# Altium schematic symbol library Lab4_Altium_Files.SCHLIB: 90 symbols (part 1 of 2)
Pins are listed as number, name and electrical type; pins without a type are passive.

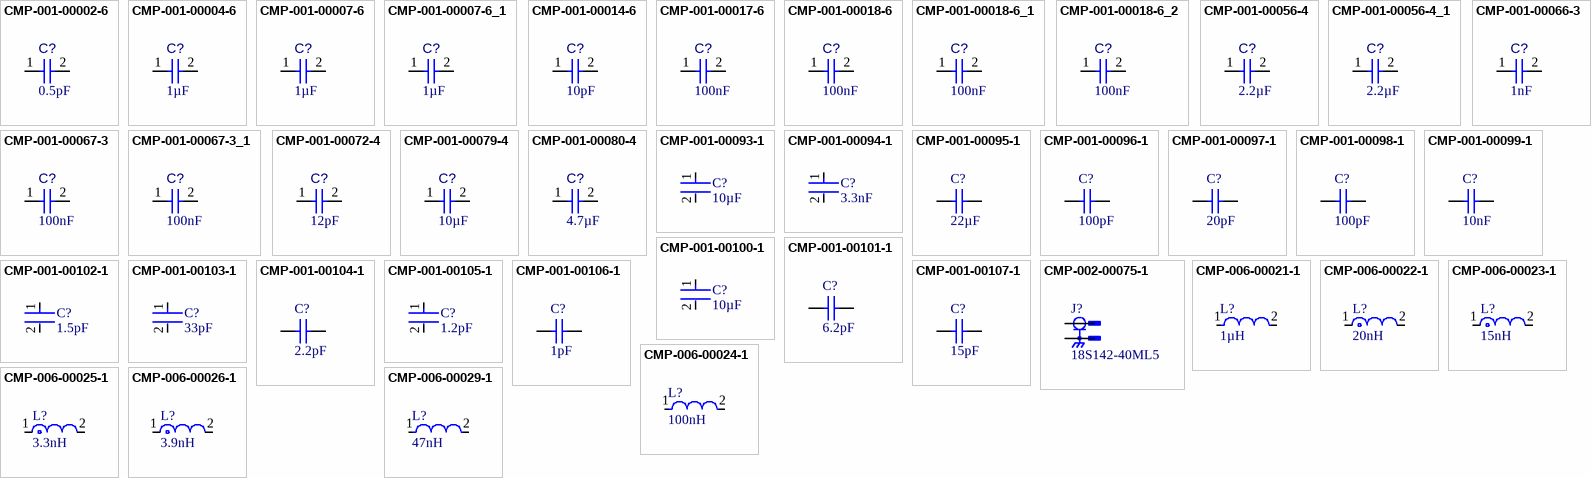
[diagram p0: symbols CMP-001-00002-6 to CMP-006-00029-1]

## CMP-001-00002-6
designator C?, comment value 0.5pF  (hidden comment: Capacitor 0.5 pF +/- 0.1pF 25 V 0402)
Chip Capacitor, 0.5 pF, +/- 0.1pF, 25 V, 0402 (1005 Metric); Voltage Rating: 25V; Tolerance: 20%; Capacitor Type: Ceramic; Max Operating Temperature: 125°C; Case/Package: 0402; Pins: 2; RoHS Compliant: True; Min Operating Temperature: -55°C; Mounting Technology: SM
footprint CAPC1005X56X25ML10T15 (Chip Capacitor, 2-Leads, Body 1.10x0.60mm, IPC Low Density)
footprint CAPC1005X56X25NL10T15 (Chip Capacitor, 2-Leads, Body 1.10x0.60mm, IPC Medium Density)
footprint CAPC1005X56X25LL10T15 (Chip Capacitor, 2-Leads, Body 1.10x0.60mm, IPC High Density)
pins: 1, 2

## CMP-001-00004-6
designator C?, comment value 1µF  (hidden comment: Capacitor 1uF +/- 10% 16V 0603)
Chip Capacitor, 1 uF, +/- 10%, 16 V, 0603 (1608 Metric); Capacitor Type: Ceramic; Mounting Technology: SM; RoHS Compliant: True; Min Operating Temperature: -55°C; Case/Package: 0603; Pins: 2; Voltage Rating: 16V; Max Operating Temperature: 125°C; Tolerance: 10%
footprint CAPC1608X90X35ML15T15 (Chip Capacitor, 2-Leads, Body 1.75x0.95mm, IPC Low Density)
footprint CAPC1608X90X35NL15T15 (Chip Capacitor, 2-Leads, Body 1.75x0.95mm, IPC Medium Density)
footprint CAPC1608X90X35LL15T15 (Chip Capacitor, 2-Leads, Body 1.75x0.95mm, IPC High Density)
pins: 1, 2

## CMP-001-00007-6
designator C?, comment value 1µF  (hidden comment: Capacitor 1 uF +/- 10% 50 V 0805)
Chip Capacitor, 1 uF, +/- 10%, 50 V, 0805 (2012 Metric); Capacitor Type: Ceramic; Voltage Rating: 50V; Min Operating Temperature: -55°C; RoHS Compliant: True; Mounting Technology: SM; Case/Package: 0805; Max Operating Temperature: 125°C; Tolerance: 10%; Pins: 2
footprint CAPC2013X135X45NL10T25 (Chip Capacitor, 2-Leads, Body 2.10x1.35mm, IPC Medium Density)
footprint CAPC2013X135X45LL10T25 (Chip Capacitor, 2-Leads, Body 2.10x1.35mm, IPC High Density)
footprint CAPC2013X135X45ML10T25 (Chip Capacitor, 2-Leads, Body 2.10x1.35mm, IPC Low Density)
pins: 1, 2

## CMP-001-00007-6_1
designator C?, comment value 1µF  (hidden comment: Capacitor 1 uF +/- 10% 50 V 0805)
Chip Capacitor, 1 uF, +/- 10%, 50 V, 0805 (2012 Metric); Manufacturer: TDK; Manufacturer Part Number: C2012X7R1H105K125AB; Manufacturer: Murata; Manufacturer Part Number: GRM21BR71H105KA12L; Manufacturer: Kyocera / AVX; Manufacturer Part Number: 08055C105KAT2A; Capacitor Type: Ceramic; Voltage Rating: 50V; Min Operating Temperature: -55°C; RoHS Compliant: True; Mounting Technology: SM; Case/Package: 0805; Max Operating Temperature: 125°C; Tolerance: 10%; Pins: 2; Component Type: Capacitors
footprint CAPC2013X135X45NL10T25 (Chip Capacitor, 2-Leads, Body 2.10x1.35mm, IPC Medium Density)
footprint CAPC2013X135X45LL10T25 (Chip Capacitor, 2-Leads, Body 2.10x1.35mm, IPC High Density)
footprint CAPC2013X135X45ML10T25 (Chip Capacitor, 2-Leads, Body 2.10x1.35mm, IPC Low Density)
pins: 1, 2

## CMP-001-00014-6
designator C?, comment value 10pF  (hidden comment: Capacitor 10 pF +/- 5% 50 V 0603)
Chip Capacitor, 10 pF, +/- 5%, 50 V, 0603 (1608 Metric); Capacitor Type: Ceramic; Voltage Rating: 50V; RoHS Compliant: True; Case/Package: 0603; Max Operating Temperature: 125°C; Pins: 2; Tolerance: 5%; Mounting Technology: SM; Min Operating Temperature: -55°C
footprint CAPC1608X90X40ML10T20 (Chip Capacitor, 2-Leads, Body 1.70x0.90mm, IPC Low Density)
footprint CAPC1608X90X40LL10T20 (Chip Capacitor, 2-Leads, Body 1.70x0.90mm, IPC High Density)
footprint CAPC1608X90X40NL10T20 (Chip Capacitor, 2-Leads, Body 1.70x0.90mm, IPC Medium Density)
pins: 1, 2

## CMP-001-00017-6
designator C?, comment value 100nF  (hidden comment: Capacitor 100 nF +/-10% 50 V 0603)
Chip Capacitor, 100 nF, +/- 10%, 50 V, 0603 (1608 Metric); Voltage Rating: 50V; Capacitor Type: Ceramic; Tolerance: 10%; Mounting Technology: SM; Max Operating Temperature: 125°C; RoHS Compliant: True; Pins: 2; Case/Package: 0603; Min Operating Temperature: -55°C
footprint CAPC1608X90X40NL10T20 (Chip Capacitor, 2-Leads, Body 1.70x0.90mm, IPC Medium Density)
footprint CAPC1608X90X40LL10T20 (Chip Capacitor, 2-Leads, Body 1.70x0.90mm, IPC High Density)
footprint CAPC1608X90X40ML10T20 (Chip Capacitor, 2-Leads, Body 1.70x0.90mm, IPC Low Density)
pins: 1, 2

## CMP-001-00018-6
designator C?, comment value 100nF  (hidden comment: Capacitor 100 nF +/-10% 50 V 0805)
Chip Capacitor, 100 nF, +/- 10%, 50 V, 0805 (2012 Metric); Capacitor Type: Ceramic; Voltage Rating: 50V; Pins: 2; Max Operating Temperature: 125°C; Min Operating Temperature: -55°C; Mounting Technology: SM; Case/Package: 0805; RoHS Compliant: True; Tolerance: 10%
footprint CAPC2013X95X50LL10T25 (Chip Capacitor, 2-Leads, Body 2.10x1.35mm, IPC High Density)
footprint CAPC2013X95X50NL10T25 (Chip Capacitor, 2-Leads, Body 2.10x1.35mm, IPC Medium Density)
footprint CAPC2013X95X50ML10T25 (Chip Capacitor, 2-Leads, Body 2.10x1.35mm, IPC Low Density)
pins: 1, 2

## CMP-001-00018-6_1
designator C?, comment value 100nF  (hidden comment: Capacitor 100 nF +/-10% 50 V 0805)
Chip Capacitor, 100 nF, +/- 10%, 50 V, 0805 (2012 Metric); Manufacturer: Yageo Group; Manufacturer Part Number: CC0805KRX7R9BB104; Manufacturer: Murata; Manufacturer Part Number: GRM21BR71H104KA01L; Capacitor Type: Ceramic; Voltage Rating: 50V; Pins: 2; Max Operating Temperature: 125°C; Min Operating Temperature: -55°C; Mounting Technology: SM; Case/Package: 0805; RoHS Compliant: True; Tolerance: 10%; Component Type: Capacitors
footprint CAPC2013X95X50LL10T25 (Chip Capacitor, 2-Leads, Body 2.10x1.35mm, IPC High Density)
footprint CAPC2013X95X50NL10T25 (Chip Capacitor, 2-Leads, Body 2.10x1.35mm, IPC Medium Density)
footprint CAPC2013X95X50ML10T25 (Chip Capacitor, 2-Leads, Body 2.10x1.35mm, IPC Low Density)
pins: 1, 2

## CMP-001-00018-6_2
designator C?, comment value 100nF  (hidden comment: Capacitor 100 nF +/-10% 50 V 0805)
Chip Capacitor, 100 nF, +/- 10%, 50 V, 0805 (2012 Metric); Capacitor Type: Ceramic; Voltage Rating: 50V; Pins: 2; Max Operating Temperature: 125°C; Min Operating Temperature: -55°C; Mounting Technology: SM; Case/Package: 0805; RoHS Compliant: True; Tolerance: 10%
footprint CAPC2013X95X50LL10T25 (Chip Capacitor, 2-Leads, Body 2.10x1.35mm, IPC High Density)
footprint CAPC2013X95X50NL10T25 (Chip Capacitor, 2-Leads, Body 2.10x1.35mm, IPC Medium Density)
footprint CAPC2013X95X50ML10T25 (Chip Capacitor, 2-Leads, Body 2.10x1.35mm, IPC Low Density)
pins: 1, 2

## CMP-001-00056-4
designator C?, comment value 2.2µF  (hidden comment: Capacitor 2,2µF +/-20% 10V 0402)
Chip Capacitor, 2,2µF +/-20%, 10V, 0402, Thickness 0.6 mm; Tolerance: 10%; Mounting Technology: SMT; Max Operating Temperature: 85°C; Case/Package: 0402; Pins: 2; Min Operating Temperature: -55°C; Voltage Rating: 10V
footprint CAPC0402(1005)60_L (Chip Capacitor, Body 1.0x0.5mm, Height 0.6mm, IPC High Density)
pins: 1, 2

## CMP-001-00056-4_1
designator C?, comment value 2.2µF  (hidden comment: Capacitor 2,2µF +/-20% 10V 0402)
Chip Capacitor, 2,2µF +/-20%, 10V, 0402, Thickness 0.6 mm; Manufacturer: Samsung Electro-Mechanics; Manufacturer Part Number: CL05A225KP7NSB8; Manufacturer: Murata; Manufacturer Part Number: GRM155R61C225KE11D; Manufacturer: TDK; Manufacturer Part Number: C1005X5R1A225K; Manufacturer Part Number: GRM155R61A225KE95D; Manufacturer Part Number: GRM155R61C225KE44D; Manufacturer Part Number: GRT155R61E225KE13D; Tolerance: 10%; Mounting Technology: SMT; Max Operating Temperature: 85°C; Case/Package: 0402; Pins: 2; Min Operating Temperature: -55°C; Voltage Rating: 10V; Component Type: Capacitors
footprint CAPC0402(1005)60_L (Chip Capacitor, Body 1.0x0.5mm, Height 0.6mm, IPC High Density)
pins: 1, 2

## CMP-001-00066-3
designator C?, comment value 1nF  (hidden comment: Capacitor 1nF +/-20% 50V 0402)
Chip Capacitor, 1nF +/-20%, 50V, 0402, Thickness 0.33 mm; Tolerance: 10%; Case/Package: 0402; Pins: 2; Min Operating Temperature: -55°C; Max Operating Temperature: 85°C; Voltage Rating: 50V; Mounting Technology: SMT
footprint CAPC0402(1005)33_L (Chip Capacitor, Body 1.0x0.5mm, Height 0.33mm, IPC High Density)
pins: 1, 2

## CMP-001-00067-3
designator C?, comment value 100nF  (hidden comment: Capacitor 100nF +/-20% 50V 0402)
Chip Capacitor, 100nF +/-20%, 50V, 0402, Thickness 0.6 mm; Tolerance: 10%; Min Operating Temperature: -55°C; Pins: 2; Case/Package: 0402; Max Operating Temperature: 85°C; Voltage Rating: 50V; Mounting Technology: SMT
footprint CAPC0402(1005)60_L (Chip Capacitor, Body 1.0x0.5mm, Height 0.6mm, IPC High Density)
pins: 1, 2

## CMP-001-00067-3_1
designator C?, comment value 100nF  (hidden comment: Capacitor 100nF +/-20% 50V 0402)
Chip Capacitor, 100nF +/-20%, 50V, 0402, Thickness 0.6 mm; Manufacturer: Murata; Manufacturer Part Number: GRM155R61H104JE14D; Manufacturer: TAIYO YUDEN; Manufacturer Part Number: UMK105B7104KV-FR; Manufacturer: TDK; Manufacturer Part Number: C1005X7R1H104K; Manufacturer: Yageo Group; Manufacturer Part Number: CC0402KRX7R9BB104; Manufacturer Part Number: C1005X6S1H104K050BB; Manufacturer Part Number: CC0402KRX5R9BB104; Manufacturer Part Number: C1005X7R1H104K050BB; Manufacturer Part Number: GRM155R71H104KE14D; Manufacturer: KYOCERA AVX; Manufacturer Part Number: 04025D104KAT2A; Manufacturer Part Number: GCM155L81E104KE02D; Manufacturer Part Number: C1005X5R1H104K; Tolerance: 10%; Min Operating Temperature: -55°C; Pins: 2; Case/Package: 0402; Max Operating Temperature: 85°C; Voltage Rating: 50V; Mounting Technology: SMT; Component Type: Capacitors
footprint CAPC0402(1005)60_L (Chip Capacitor, Body 1.0x0.5mm, Height 0.6mm, IPC High Density)
pins: 1, 2

## CMP-001-00072-4
designator C?, comment value 12pF  (hidden comment: Capacitor 12pF +/-10% 50V 0402)
Chip Capacitor, 12pF +/-10%, 50V, 0402, Thickness 0.33 mm; Tolerance: 20%; Pins: 2; Max Operating Temperature: 85°C; Case/Package: 0402; Voltage Rating: 50V; Mounting Technology: SMT; Min Operating Temperature: -55°C
footprint CAPC0402(1005)33_L (Chip Capacitor, Body 1.0x0.5mm, Height 0.33mm, IPC High Density)
pins: 1, 2

## CMP-001-00079-4
designator C?, comment value 10µF  (hidden comment: Capacitor 10µF +/-20% 25V 0805)
Chip Capacitor, 10µF +/-20%, 25V, 0805, Thickness 1.45 mm; Manufacturer: Yageo Group; Manufacturer Part Number: CC0805KKX5R8BB106; Manufacturer: TDK; Manufacturer Part Number: C2012X5R1E106K125AB; Manufacturer: Samsung; Manufacturer Part Number: CL21A106KACLRNC; Manufacturer Part Number: C2012X5R1E106K; Manufacturer: Murata; Manufacturer Part Number: GRM21BR61E106KA73L; Manufacturer Part Number: C2012X5R1E106K085AC; Tolerance: 10%; Max Operating Temperature: 85°C; Case/Package: 0805; Voltage Rating: 25V; Min Operating Temperature: -55°C; Mounting Technology: SMT; Pins: 2; Component Type: Capacitors
footprint CAPC0805(2012)145_L (Chip Capacitor, Body 2.0x1.2mm, Height 1.45mm, IPC High Density)
pins: 1, 2

## CMP-001-00080-4
designator C?, comment value 4.7µF  (hidden comment: Capacitor 4.7µF +/-40% 25V 0805)
Chip Capacitor, 4.7µF +/-40%, 25V, 0805, Thickness 1.45 mm; Tolerance: 20%; Voltage Rating: 25V; Min Operating Temperature: -55°C; Max Operating Temperature: 85°C; Pins: 2; Mounting Technology: SMT; Case/Package: 0805
footprint CAPC0805(2012)145_L (Chip Capacitor, Body 2.0x1.2mm, Height 1.45mm, IPC High Density)
pins: 1, 2

## CMP-001-00093-1
designator C?, comment value 10µF  (hidden comment: cap 10uf 25v 0805)
0805 C 10UF Ceramic Multilayer Capacitor, 25 VDC, +85DEGC, X5R Dielec, +/-10%; Dissipation Factor: 10%; Width: 1.25mm; REACH SVHC: Unaffected; Mounting Technology: Surface Mount; Depth: 1.25mm; Dielectric: X5R; Number of Terminals: 2; Min Operating Temperature: -55°C; Packaging: Cut Tape; Lead Free: Lead Free; Voltage Rating (DC): 25V; Dielectric Material: Ceramic; Lifecycle Status: Production; Max Operating Temperature: 85°C; Country of Origin: Mexico; Case/Package: 0805; Introduction Date: 2015-10-21; Height: 1.25mm; China RoHS: Compliant; RoHS: Compliant; Case Code (Imperial): 0805; Export Control Classification Number (ECCN) Code: EAR99; Voltage: 25V; Schedule B: 8532240020; Harmonized Tariff Schedule (HTS) Code: 8532.24.00.20; Material: Ceramic; Tolerance: 10%; Length: 2mm; Voltage Rating: 25V; Case Code (Metric): 2012; Termination: Solder
footprint FP-C0805C106K3PACTU-IPC_C
footprint FP-C0805C106K3PACTU-MFG
footprint FP-C0805C106K3PACTU-IPC_A
footprint FP-C0805C106K3PACTU-IPC_B
pins: 1, 2

## CMP-001-00094-1
designator C?, comment value 3.3nF  (hidden comment: cap 3.3nF 0603 16v)
Ceramic Capacitor, Multilayer, Ceramic, 16V, 5% +Tol, 5% -Tol, X7R, 15% TC, 0.0033uF, Surface Mount, 0603; Temperature Coefficient: 30ppm/°C; Export Control Classification Number (ECCN) Code: EAR99; Dielectric Material: Ceramic; Introduction Date: 2012-06-13; Width: 800µm; RoHS: Compliant; Height: 800µm; Country of Origin: Mexico; Lifecycle Status: Production; Material: Ceramic; Voltage Rating: 16V; Harmonized Tariff Schedule (HTS) Code: 8532.24.00.20; Min Operating Temperature: -55°C; Dielectric: X7R; China RoHS: Compliant; Ratings: AEC-Q200; Mounting Technology: Surface Mount; Number of Terminals: 2; Max Operating Temperature: 125°C; Voltage Rating (DC): 16V; Length: 1.6mm; REACH SVHC: Unaffected; Case/Package: 0603
footprint FP-C0603C-CF-IPC_B
footprint FP-C0603C-CF-IPC_C
footprint FP-C0603C-CF-IPC_A
footprint FP-C0603C-CF-MFG
pins: 1, 2

## CMP-001-00095-1
designator C?, comment value 22µF  (hidden comment: cap 22uf 0805)
0805 C0805C 22UF Ceramic Multilayer Capacitor, 6.3V, +85C, X5R Dielectric, +/-10%; Tolerance: 10%; Dissipation Factor: 12%; Contact Material: Tin; Voltage Rating: 6.3V; RoHS: Compliant; Number of Terminals: 2; Max Operating Temperature: 85°C; Voltage Rating (DC): 6.3V; Voltage: 6.3V; Case Code (Imperial): 0805; Lead Free: Lead Free; Min Operating Temperature: -55°C; Width: 1.25mm; Lifecycle Status: Production; Length: 2mm; Export Control Classification Number (ECCN) Code: EAR99; Packaging: Cut Tape; Case Code (Metric): 2012; Termination: SMD/SMT; REACH SVHC: Unaffected; Dielectric: X5R; Case/Package: 0805; Introduction Date: 2008-06-04; Dielectric Material: Ceramic; Depth: 1.25mm; Height: 1.25mm; Harmonized Tariff Schedule (HTS) Code: 8532.24.00.20; China RoHS: Compliant; Schedule B: 8532240020, 8532240020; Country of Origin: Mexico; Mounting Technology: Surface Mount
footprint CAPC0805(2012)145_N (Chip Capacitor, Body 2.0x1.2mm, Height 1.45mm, IPC Medium Density)
footprint CAPC0805(2012)145_M (Chip Capacitor, Body 2.0x1.2mm, Height 1.45mm, IPC Low Density)
footprint CAPC0805(2012)145_L (Chip Capacitor, Body 2.0x1.2mm, Height 1.45mm, IPC High Density)
pins: 1, 2
1 alternate drawing of the same symbol

## CMP-001-00096-1
designator C?, comment value 100pF  (hidden comment: cap 100p)
Ceramic Capacitor, Multilayer, Ceramic, 50V, 1% +Tol, 1% -Tol, C0G, 30ppm/Cel TC, 0.0001uF, Surface Mount, 0402; Packaging: Tape and Reel; Height: 600µm; Min Operating Temperature: -55°C; Max Operating Temperature: 150°C; China RoHS: Compliant; Width: 500µm; Case/Package: 0402; Depth: 500µm; REACH SVHC: Unaffected; Lifecycle Status: Production; Voltage Rating (DC): 50V; Mounting Technology: Surface Mount; Tolerance: 1%; Dielectric: C0G; Dielectric Material: Ceramic; Number of Terminals: 2; Length: 1mm; RoHS: Compliant
footprint CAPC1005X60X26ML10T16 (Chip Capacitor, 2-Leads, Body 1.00x0.50mm, IPC Low Density)
footprint CAPC1005X60X26LL10T16 (Chip Capacitor, 2-Leads, Body 1.00x0.50mm, IPC High Density)
footprint CAPC1005X60X26NL10T16 (Chip Capacitor, 2-Leads, Body 1.00x0.50mm, IPC Medium Density)
pins: 1, 2
1 alternate drawing of the same symbol

## CMP-001-00097-1
designator C?, comment value 20pF  (hidden comment: cap 20p 0603)
0603 20 pF 50 V ±10 % Tolerance C0G/NP0 SMT Multilayer Ceramic Capacitor; Tolerance: 10%; Voltage Rating: 50V; Pins: 2; Min Operating Temperature: -55°C; Max Operating Temperature: 125°C; Mounting Technology: Surface Mount; Case/Package: 0603
footprint CAPC1608X90X35LL15T15 (Chip Capacitor, 2-Leads, Body 1.60x0.81mm, IPC High Density)
footprint CAPC1608X90X35NL15T15 (Chip Capacitor, 2-Leads, Body 1.60x0.81mm, IPC Medium Density)
footprint CAPC1608X90X35ML15T15 (Chip Capacitor, 2-Leads, Body 1.60x0.81mm, IPC Low Density)
pins: 1, 2
1 alternate drawing of the same symbol

## CMP-001-00098-1
designator C?, comment value 100pF  (hidden comment: cap 100pF 0603)
Ceramic Capacitor, Multilayer, Ceramic, 100V, 10% +Tol, 10% -Tol, C0G, 30ppm/Cel TC, 0.0001uF, Surface Mount, 0603; RoHS: Compliant; China RoHS: Compliant; Case/Package: 0603; Mounting Technology: Surface Mount; Max Operating Temperature: 150°C; Dielectric Material: Ceramic; Number of Terminals: 2; Export Control Classification Number (ECCN) Code: EAR99; Country of Origin: Israel; Harmonized Tariff Schedule (HTS) Code: 8532.24.00.20; Min Operating Temperature: -55°C; Case Code (Metric): 1608; Tolerance: 10%; Termination: SMD/SMT; Lifecycle Status: Production; Voltage Rating (DC): 100V; Depth: 800µm; Length: 1.6mm; Width: 800µm; Dielectric: C0G; Height: 970µm; Case Code (Imperial): 0603; Introduction Date: 1999-11-09; REACH SVHC: Unaffected
footprint CAPC1608X92X38LL15T08 (Chip Capacitor, 2-Leads, Body 1.60x0.80mm, IPC High Density)
footprint CAPC1608X92X38NL15T08 (Chip Capacitor, 2-Leads, Body 1.60x0.80mm, IPC Medium Density)
footprint CAPC1608X92X38ML15T08 (Chip Capacitor, 2-Leads, Body 1.60x0.80mm, IPC Low Density)
pins: 1, 2
1 alternate drawing of the same symbol

## CMP-001-00099-1
designator C?, comment value 10nF  (hidden comment: cap 10nF 0603)
Ceramic Capacitor, Multilayer, Ceramic, 50V, 10% +Tol, 10% -Tol, X7R, 15% TC, 0.01uF, Surface Mount, 0603; Lifecycle Status: Production; REACH SVHC: Unaffected; Depth: 800µm; Dielectric: X7R; China RoHS: Non-Compliant; Width: 800µm; Min Operating Temperature: -55°C; RoHS: Compliant; Max Operating Temperature: 150°C; Voltage Rating (DC): 50V; Length: 1.6mm; Height: 970µm; Tolerance: 10%; Case/Package: 0603; Mounting Technology: Surface Mount; Number of Terminals: 2; Dielectric Material: Ceramic
footprint CAPC1608X92X38LL15T08 (Chip Capacitor, 2-Leads, Body 1.60x0.80mm, IPC High Density)
footprint CAPC1608X92X38NL15T08 (Chip Capacitor, 2-Leads, Body 1.60x0.80mm, IPC Medium Density)
footprint CAPC1608X92X38ML15T08 (Chip Capacitor, 2-Leads, Body 1.60x0.80mm, IPC Low Density)
pins: 1, 2
1 alternate drawing of the same symbol

## CMP-001-00100-1
designator C?, comment value 10µF  (hidden comment: cap 10uF 0603)
16V 10uF X5R ±10% 0603 Multilayer Ceramic Capacitors MLCC - SMD/SMT ROHS; Dielectric Material: Ceramic; Number of Terminals: 2; RoHS: Compliant; Export Control Classification Number (ECCN) Code: EAR99; REACH SVHC: Unaffected; Height: 800µm; Introduction Date: 2014-07-08; Mounting Technology: Surface Mount; Tolerance: 10%; Length: 1.6mm; Country of Origin: Mainland China, Taiwan; Halogen Free: Halogen Free; Voltage Rating: 16V; Harmonized Tariff Schedule (HTS) Code: 8532.24.00.20; China RoHS: Compliant; Min Operating Temperature: -55°C; Lifecycle Status: Production; Lead Free: Lead Free; Material: Ceramic; Dielectric: X5R; Max Operating Temperature: 85°C; Voltage Rating (DC): 16V; Case/Package: 0603; Width: 800µm
footprint FP-CC0603-DC-IPC_B
footprint FP-CC0603-DC-MFG
footprint FP-CC0603-DC-IPC_C
footprint FP-CC0603-DC-IPC_A
pins: 1, 2

## CMP-001-00101-1
designator C?, comment value 6.2pF  (hidden comment: cap 6.2pF 0603)
50V 6.2pF C0G 0603 Multilayer Ceramic Capacitors MLCC - SMD/SMT ROHS; Export Control Classification Number (ECCN) Code: EAR99; Termination: SMD/SMT; Length: 1.6mm; Number of Terminals: 2; Dielectric Material: Ceramic; Lifecycle Status: Production; Voltage Rating (DC): 50V; Weight: 2.012816mg; Case Code (Imperial): 0603; Dielectric: C0G; Width: 812.8µm; Lead Free: Lead Free; RoHS: Compliant; Thickness: 889µm; Mounting Technology: Surface Mount; Introduction Date: 2013-04-23; Max Operating Temperature: 125°C; China RoHS: Compliant; Radiation Hardening: No; Depth: 810µm; Harmonized Tariff Schedule (HTS) Code: 8532.24.00.20; Voltage Rating: 50V; Case Code (Metric): 1608; Case/Package: 0603; REACH SVHC: Unaffected; Min Operating Temperature: -55°C
footprint CAPC1608X90X35LL15T15 (Chip Capacitor, 2-Leads, Body 1.60x0.81mm, IPC High Density)
footprint CAPC1608X90X35NL15T15 (Chip Capacitor, 2-Leads, Body 1.60x0.81mm, IPC Medium Density)
footprint CAPC1608X90X35ML15T15 (Chip Capacitor, 2-Leads, Body 1.60x0.81mm, IPC Low Density)
pins: 1, 2
1 alternate drawing of the same symbol

## CMP-001-00102-1
designator C?, comment value 1.5pF  (hidden comment: cap 1.5pF)
Ceramic Capacitor, Multilayer, Ceramic, 50V, 16.67% +Tol, 16.67% -Tol, CH, 60ppm/Cel TC, 0.0000015uF, Surface Mount,...; Manufacturer Lifecycle Status: IN PRODUCTION; Temperature Coefficient: 60ppm/°C; Lifecycle Status: Production; Number of Terminals: 2; RoHS: Compliant; Voltage Rating (DC): 50V; Case/Package: 0402; REACH SVHC: Unaffected; Mounting Technology: Surface Mount; Length: 1mm; Voltage Rating: 50V; Height: 500µm; Thickness: 500µm; Min Operating Temperature: -55°C; Width: 500µm; Material: Ceramic; Dielectric Material: Ceramic; Max Operating Temperature: 125°C
footprint FP-GJM155-0_05-IPC_A
footprint FP-GJM155-0_05-IPC_B
footprint FP-GJM155-0_05-MFG
footprint FP-GJM155-0_05-IPC_C
pins: 1, 2

## CMP-001-00103-1
designator C?, comment value 33pF  (hidden comment: cap 33pF 0603)
Ceramic Capacitor, Multilayer, Ceramic, 50V, 20% +Tol, 20% -Tol, X8R, 15% TC, 3.3e-05uF, Surface Mount, 0603; Temperature Coefficient: 30ppm/°C; Min Operating Temperature: -55°C; Dielectric Material: Ceramic; RoHS: Compliant; Mounting Technology: Surface Mount; Lifecycle Status: Production; Lead Free: Lead Free; Number of Terminals: 2; China RoHS: Compliant; Width: 800µm; Length: 1.6mm; Country of Origin: Mexico; Voltage Rating: 50V; REACH SVHC: Unaffected; Material: Ceramic; Harmonized Tariff Schedule (HTS) Code: 8532.24.00.20; Introduction Date: 2017-10-02; Export Control Classification Number (ECCN) Code: EAR99; Max Operating Temperature: 150°C; Case/Package: 0603; Voltage Rating (DC): 50V; Height: 800µm; Dielectric: X8R
footprint FP-C0603C-CF-IPC_B
footprint FP-C0603C-CF-IPC_C
footprint FP-C0603C-CF-IPC_A
footprint FP-C0603C-CF-MFG
pins: 1, 2

## CMP-001-00104-1
designator C?, comment value 2.2pF  (hidden comment: cap 2.2pF 0603)
Ceramic Capacitor, Multilayer, Ceramic, 16V, 0% +Tol, 0% -Tol, C0G, 30ppm/Cel TC, 0.0000022uF, Surface Mount, 0603; Case Code (Imperial): 0603; China RoHS: Compliant; Min Operating Temperature: -55°C; Case Code (Metric): 1608; Dielectric Material: Ceramic; Case/Package: 0603; Width: 800µm; RoHS: Compliant; Dielectric: C0G; Number of Terminals: 2; Length: 1.6mm; Max Operating Temperature: 125°C; Height: 870µm; Voltage Rating (DC): 16V; REACH SVHC: Unaffected; Export Control Classification Number (ECCN) Code: EAR99; Lifecycle Status: Production; Mounting Technology: Surface Mount; Termination: SMD/SMT; Depth: 800µm; Harmonized Tariff Schedule (HTS) Code: 8532.24.00.20
footprint CAPC0603(1608)100_N (Chip Capacitor, Body 1.6x0.8mm, Height 1.0mm, IPC Medium Density)
footprint CAPC0603(1608)100_L (Chip Capacitor, Body 1.6x0.8mm, Height 1.0mm, IPC High Density)
footprint CAPC0603(1608)100_M (Chip Capacitor, Body 1.6x0.8mm, Height 1.0mm, IPC Low Density)
pins: 1, 2
1 alternate drawing of the same symbol

## CMP-001-00105-1
designator C?, comment value 1.2pF  (hidden comment: cap 1.2pF 0603)
Cap Ceramic 1.2pF 50V C0G 0.5pF SMD 0603 125°C Paper T/R; Temperature Coefficient: 30ppm/°C; Dissipation Factor: 0.1%; Case Code (Imperial): 0603; Voltage Rating: 50V; RoHS: Compliant; Lead Pitch: 700µm; Country of Origin: Mexico; REACH SVHC: Unaffected; Lifecycle Status: Production; Introduction Date: 2008-06-06; Number of Terminals: 2; Lead Free: Lead Free; Min Operating Temperature: -55°C; Voltage Rating (DC): 50V; Material: Ceramic; Case Code (Metric): 1608; Depth: 800µm; Termination: SMD/SMT; China RoHS: Compliant; Case/Package: 0603; Dielectric Material: Ceramic; Dielectric: C0G; Mounting Technology: Surface Mount; Length: 1.6mm; Max Operating Temperature: 125°C; Harmonized Tariff Schedule (HTS) Code: 8532.24.00.20; Width: 800µm; Height: 800µm; Contact Material: Tin; Thickness: 863.6µm; Export Control Classification Number (ECCN) Code: EAR99
footprint FP-C0603C-CF-IPC_B
footprint FP-C0603C-CF-IPC_C
footprint FP-C0603C-CF-IPC_A
footprint FP-C0603C-CF-MFG
pins: 1, 2

## CMP-001-00106-1
designator C?, comment value 1pF  (hidden comment: cap 1pF 0603)
Ceramic Capacitor, Multilayer, Ceramic, 50V, 10% +Tol, 10% -Tol, C0G, 30ppm/Cel TC, 1e-06uF, Surface Mount, 0603; Export Control Classification Number (ECCN) Code: EAR99; Lifecycle Status: Production; Height: 970µm; Dielectric: C0G; Max Operating Temperature: 150°C; Number of Terminals: 2; China RoHS: Compliant; Introduction Date: 2007-07-09; RoHS: Compliant; Depth: 800µm; Case Code (Imperial): 0603; Width: 800µm; Case/Package: 0603; Voltage Rating (DC): 50V; Harmonized Tariff Schedule (HTS) Code: 8532.24.00.20; Country of Origin: Israel; Termination: SMD/SMT; Length: 1.6mm; Case Code (Metric): 1608; REACH SVHC: Unaffected; Min Operating Temperature: -55°C; Mounting Technology: Surface Mount; Dielectric Material: Ceramic
footprint CAPC1608X92X38LL15T08 (Chip Capacitor, 2-Leads, Body 1.60x0.80mm, IPC High Density)
footprint CAPC1608X92X38NL15T08 (Chip Capacitor, 2-Leads, Body 1.60x0.80mm, IPC Medium Density)
footprint CAPC1608X92X38ML15T08 (Chip Capacitor, 2-Leads, Body 1.60x0.80mm, IPC Low Density)
pins: 1, 2
1 alternate drawing of the same symbol

## CMP-001-00107-1
designator C?, comment value 15pF  (hidden comment: cap 15pF 0603)
VJ 0603 (1608Metric) Ceramic Capacitor 0.063Lx0.031W 1.60mmx0.80mm C0G NP0 ±10% 15pF; Voltage Rating (DC): 50V; Mounting Technology: Surface Mount; Case Code (Imperial): 0603; REACH SVHC: Unaffected; Depth: 800µm; Dielectric Material: Ceramic; Lifecycle Status: Production; Number of Terminals: 2; Length: 1.6mm; Max Operating Temperature: 150°C; Termination: SMD/SMT; China RoHS: Compliant; Width: 800µm; Tolerance: 10%; Height: 970µm; Min Operating Temperature: -55°C; Radiation Hardening: No; RoHS: Compliant; Case Code (Metric): 1608; Dielectric: C0G; Case/Package: 0603
footprint CAPC1608X92X38LL15T08 (Chip Capacitor, 2-Leads, Body 1.60x0.80mm, IPC High Density)
footprint CAPC1608X92X38NL15T08 (Chip Capacitor, 2-Leads, Body 1.60x0.80mm, IPC Medium Density)
footprint CAPC1608X92X38ML15T08 (Chip Capacitor, 2-Leads, Body 1.60x0.80mm, IPC Low Density)
pins: 1, 2
1 alternate drawing of the same symbol

## CMP-002-00075-1
designator J?, comment 18S142-40ML5
SMP, Mini Connector Plug, Male Pin 50 Ohms Surface Mount Solder; MF: Rosenberger; Case/Package: None; Source: 18S142-40ML5.SchLib; Design Item ID: 18S142-40ML5; MP: 18S142-40ML5; Check_prices: https://www.snapeda.com/parts/18S142-40ML5/Rosenberger/view-part/?ref=eda; Pins: 2; Component Type: Standard; SnapEDA_Link: https://www.snapeda.com/parts/18S142-40ML5/Rosenberger/view-part/?ref=snap; Value: *; Component Type: Connectors
footprint ROSENBERGER_18S142-40ML5
pins: 1, G1 2

## CMP-006-00021-1
designator L?, comment value 1µH  (hidden comment: ind 1uH)
Inductor General Purpose Chip Wirewound 1uH 20% 7.96MHz Ferrite 0.69A 0.13Ohm DCR 0806 T/R; Max Current Rating: 690mA; Number of Circuits: 1; ESR: 130mΩ; Self Resonant Frequency: 100MHz; Shielding: Unshielded; REACH SVHC: Unaffected; Composition: Wirewound; Termination: SMD/SMT; Max DC Current: 690mA; Min Width: 1.4mm; Core Material: Ferrite; Depth: 1.8mm; Case/Package: 0806; Max Operating Temperature: 105°C; Current Rating: 690mA; RoHS: Compliant; Schedule B: 8504500000, 8504500000; Test Frequency: 7.96MHz; DC Current: 690mA; Radiation Hardening: No; Max Width: 1.8mm; Halogen Free: Halogen Free; Case Code (Metric): 2016; Pins: 2; Length: 2mm; Lead Pitch: 1mm; Height - Seated (Max): 1.8034mm; Max Length: 2.2mm; Case Code (Imperial): 0806; Packaging: Tape & Reel (TR); Tolerance: 20%; Lead Free: Lead Free; China RoHS: Compliant; Military Standard: Not; Height: 1.6mm; Number of Terminals: 2; Min Operating Temperature: -40°C; RMS Current (Irms): 690mA; Lifecycle Status: Production; Min Length: 1.8mm; Width: 1.6mm; Mounting Technology: Surface Mount; DC Resistance (DCR): 130mΩ
footprint FP-LB2016-1_6-0_2-IPC_A
footprint FP-LB2016-1_6-0_2-IPC_C
footprint FP-LB2016-1_6-0_2-IPC_B
footprint FP-LB2016-1_6-0_2-MFG
pins: 1, 2

## CMP-006-00022-1
designator L?, comment value 20nH  (hidden comment: ind 20nH 0402)
General Purpose Inductor, 0.02uH, 3%, 1 Element, Reflow soldering, 1005/0402; Manufacturer Lifecycle Status: IN PRODUCTION; Shielding: Unshielded; Test Frequency: 250MHz; Max Current Rating: 260mA; ESR: 1.1Ω; Self Resonant Frequency: 2.1GHz; Q Factor: 20; Core Material: Air; Number of Circuits: 1; Width: 600µm; Max Operating Temperature: 125°C; Export Control Classification Number (ECCN) Code: EAR99; REACH SVHC: Unaffected; Tolerance: 3%; Number of Terminals: 2; Lifecycle Status: Production; Length: 1mm; Harmonized Tariff Schedule (HTS) Code: 8504.50.80.00; Case/Package: 0402; DC Resistance (DCR): 1.1Ω; RMS Current (Irms): 260mA; Height: 500µm; Country of Origin: Japan; Ratings: AEC-Q200; Current Rating: 260mA; Min Operating Temperature: -55°C; RoHS: Compliant; Introduction Date: 2018-02-22
footprint FP-LQG15WH_02-MFG
footprint FP-LQG15WH_02-IPC_A
footprint FP-LQG15WH_02-IPC_C
footprint FP-LQG15WH_02-IPC_B
pins: 1, 2

## CMP-006-00023-1
designator L?, comment value 15nH  (hidden comment: ind 15nH 0201)
Inductor RF Chip Thin Film 15nH 3% 500MHz 12Q-Factor 250mA 700mOhm DCR 0201 Paper T/R; Manufacturer Lifecycle Status: IN PRODUCTION; Manufacturer Package Identifier: 0805 (2012 metric); Self Resonant Frequency: 2.6GHz; ESR: 700mΩ; Q Factor: 12; Shielding: Unshielded; Number of Circuits: 1; Core Material: Non-Magnetic; Case/Package: 0201; Height - Seated (Max): 330.2µm; Termination: SMD/SMT; DC Current: 250mA; Min Operating Temperature: -55°C; Height: 300µm; Military Standard: Not; Width: 300µm; Max Operating Temperature: 125°C; Mounting Technology: Surface Mount; RoHS: Compliant; Depth: 330µm; Radiation Hardening: No; Test Frequency: 500MHz; REACH SVHC: Unaffected; RMS Current (Irms): 250mA; Case Code (Metric): 0603; Composition: Thin Film; DC Resistance (DCR): 700mΩ; Number of Terminals: 2; Tolerance: 3%; Case Code (Imperial): 0201; Max Current Rating: 250mA; Max DC Current: 250mA; Length: 600µm; Lifecycle Status: Production; Schedule B: 8504500000, 8504500000; Packaging: Tape & Reel (TR); Current Rating: 250mA
footprint FP-LQP03TG_02-IPC_C
footprint FP-LQP03TG_02-IPC_A
footprint FP-LQP03TG_02-MFG
footprint FP-LQP03TG_02-IPC_B
pins: 1, 2

## CMP-006-00024-1
designator L?, comment value 100nH  (hidden comment: ind 100nH)
General Purpose Inductor, 0.1uH, 5%, 1 Element, Ceramic-Core, SMD, 0402; ESR: 1.2Ω; Test Frequency: 250MHz; Current Rating: 310mA; Number of Circuits: 1; Self Resonant Frequency: 1.58GHz; Shielding: Unshielded; Lead Free: Contains Lead; Export Control Classification Number (ECCN) Code: EAR99; Height: 660µm; Inductance Tolerance: 5%; Country of Origin: Mainland China, Vietnam; LTD Date: 2021-03-01; LTB Date: 2021-03-01; Width: 660µm; Termination: SMD/SMT; DC Resistance (DCR): 1.2Ω; Lifecycle Status: Obsolete; Case Code (Imperial): 0402; Composition: Wirewound; Tolerance: 5%; Case/Package: 0402; Max Current Rating: 310mA; Core Material: Ceramic; Mounting Technology: Surface Mount; Harmonized Tariff Schedule (HTS) Code: 8504.50.80.00; RMS Current (Irms): 310mA; Case Code (Metric): 1005; Packaging: Cut Tape; Max Operating Temperature: 125°C; Min Operating Temperature: -40°C; Number of Terminals: 2; REACH SVHC: Unaffected; China RoHS: Non-Compliant; RoHS: Compliant; Introduction Date: 2009-03-31; Ambient Temperature Range High: 125°C; Length: 1.12mm; Max DC Current: 310mA
footprint FP-0402HPH-MFG
pins: 1, 2

## CMP-006-00025-1
designator L?, comment value 3.3nH  (hidden comment: ind 3.3nH 0603)
General Purpose Inductor, 0.0033uH, 9.0909%, 1 Element, Reflow soldering, 1608/0603; Manufacturer Lifecycle Status: IN PRODUCTION; Q Factor: 12; Self Resonant Frequency: 4GHz; Core Material: Air; Max Current Rating: 900mA; Tolerance: 9.09%; ESR: 140mΩ; Shielding: Unshielded; Test Frequency: 100MHz; Number of Circuits: 1; Number of Terminals: 2; Case/Package: 0603; Lifecycle Status: Production; Height: 800µm; Min Operating Temperature: -55°C; Ratings: AEC-Q200; Width: 800µm; REACH SVHC: Unaffected; Termination: SMD/SMT; RoHS: Compliant; Current Rating: 900mA; Max Operating Temperature: 125°C; Length: 1.6mm; RMS Current (Irms): 900mA; DC Resistance (DCR): 140mΩ
footprint FP-LQG18HH_00-IPC_A
footprint FP-LQG18HH_00-IPC_B
footprint FP-LQG18HH_00-IPC_C
footprint FP-LQG18HH_00-MFG
pins: 1, 2

## CMP-006-00026-1
designator L?, comment value 3.9nH  (hidden comment: ind 3.9nH 0603)
General Purpose Inductor, 0.0039uH, 7.6923%, 1 Element, Reflow soldering, 1608/0603; Manufacturer Lifecycle Status: IN PRODUCTION; DC Resistance (DCR): 150mΩ; Max Current Rating: 900mA; Q Factor: 12; Number of Circuits: 1; Test Frequency: 100MHz; Core Material: Air; Shielding: Unshielded; Tolerance: 7.69%; Self Resonant Frequency: 3GHz; Lifecycle Status: Production; RoHS: Compliant; ESR: 150mΩ; Number of Terminals: 2; Height: 800µm; RMS Current (Irms): 900mA; Ratings: AEC-Q200; Current Rating: 900mA; Min Operating Temperature: -55°C; Case/Package: 0603; Termination: SMD/SMT; Schedule B: 8504500000, 8504500000; REACH SVHC: Unaffected; Max Operating Temperature: 125°C; Width: 800µm; Length: 1.6mm
footprint FP-LQG18HH_00-IPC_A
footprint FP-LQG18HH_00-IPC_B
footprint FP-LQG18HH_00-IPC_C
footprint FP-LQG18HH_00-MFG
pins: 1, 2

## CMP-006-00029-1
designator L?, comment value 47nH  (hidden comment: ind 47nH)
Ind RF Chip Unshielded Multi-Layer 47nH 5% 100MHz 6Q-Factor 200mA 0402 Punched Paper T/R; Manufacturer Lifecycle Status: OBSOLETE; ESR: 1.2Ω; Core Material: Ceramic, Ferrite; Number of Circuits: 1; Self Resonant Frequency: 1.8GHz; Q Factor: 6; Number of Terminals: 2; China RoHS: Compliant; REACH SVHC: Unaffected; Schedule B: 8504500000, 8504500000; Max DC Current: 200mA; RMS Current (Irms): 200mA; Radiation Hardening: No; Width: 500µm; DC Resistance (DCR): 1.2Ω; Height - Seated (Max): 609.6µm; Lifecycle Status: Obsolete; Height: 500µm; Harmonized Tariff Schedule (HTS) Code: 8504.50.80.00; Depth: 600µm; Shielding: Unshielded; Max Operating Temperature: 125°C; Test Frequency: 100MHz; Case Code (Metric): 1005; Export Control Classification Number (ECCN) Code: EAR99; Tolerance: 5%; Min Operating Temperature: -55°C; RoHS: Compliant; Packaging: Cut Tape (CT); Min Width: 400µm; Case Code (Imperial): 0402; LTD Date: 2026-06-30; Current Rating: 200mA; Max Length: 1.1mm; Length: 1mm; Mounting Technology: Surface Mount; Min Length: 900µm; Max Width: 600µm; Max Current Rating: 200mA; Case/Package: 0402; LTB Date: 2026-03-31; Introduction Date: 2009-03-27
footprint FP-MLK1005-MFG
footprint FP-MLK1005-IPC_B
footprint FP-MLK1005-IPC_A
footprint FP-MLK1005-IPC_C
pins: 1, 2

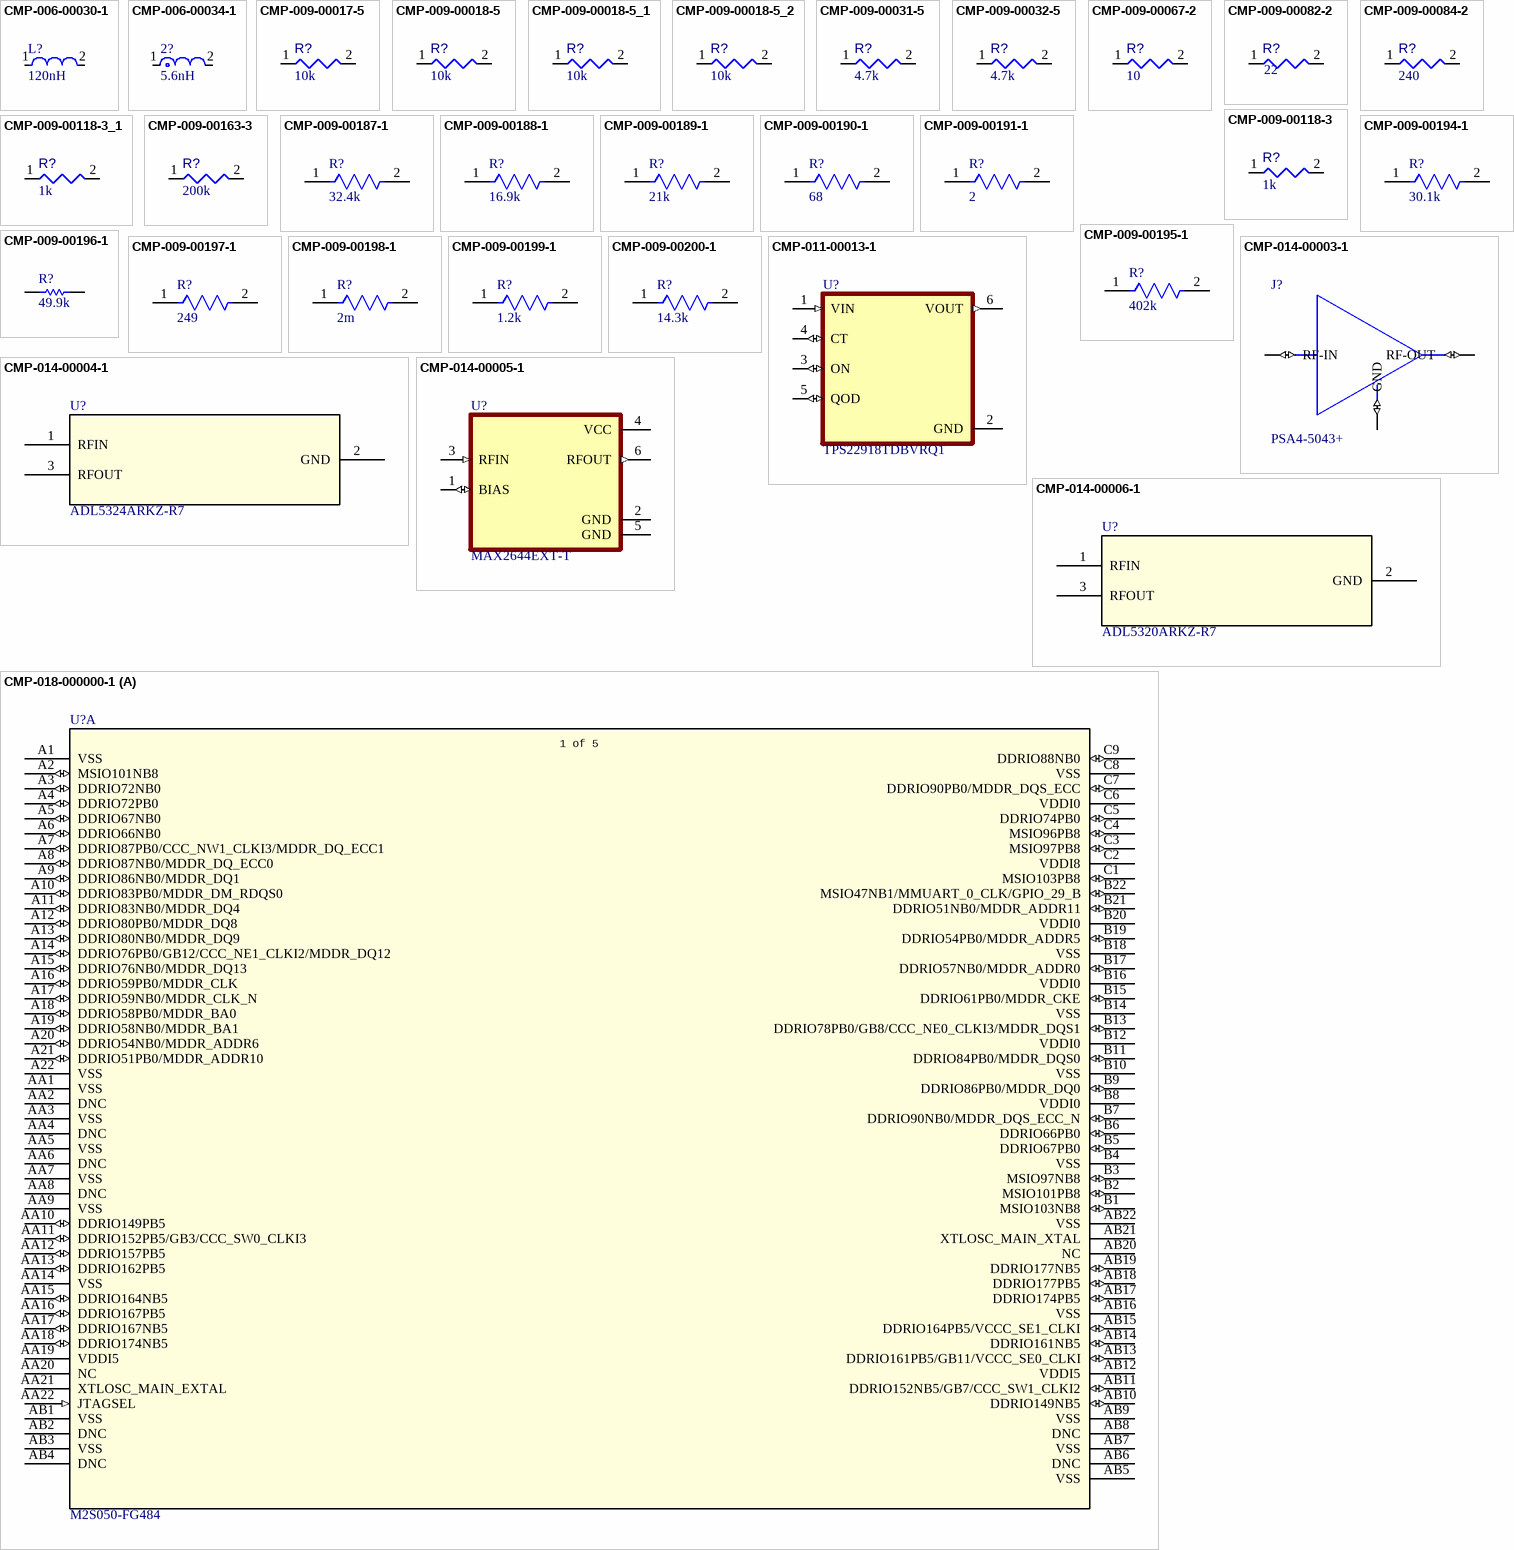
[diagram p1: symbols CMP-006-00030-1 to CMP-018-000000-1]

## CMP-006-00030-1
designator L?, comment value 120nH  (hidden comment: ind 120nH)
Ind Chip Wirewound 120nH 5% 25MHz 60Q-Factor Ceramic 650mA 1008 T/R; ESR: 630mΩ; Q Factor: 60; Number of Circuits: 1; Self Resonant Frequency: 950MHz; Shielding: Unshielded; China RoHS: Compliant; Number of Terminals: 2; Lifecycle Status: Production; Termination: SMD/SMT; Max Operating Temperature: 125°C; Depth: 2.79mm; Tolerance: 5%; Test Frequency: 25MHz; Width: 2.79mm; DC Resistance (DCR): 630mΩ; Min Operating Temperature: -40°C; Length: 2.92mm; Height - Seated (Max): 2.286mm; Height: 2.29mm; Case/Package: 1111; Radiation Hardening: No; Mounting Technology: Surface Mount; Case Code (Imperial): 1008; Max DC Current: 650mA; Case Code (Metric): 2520; REACH SVHC: Unaffected; RMS Current (Irms): 650mA; Composition: Wirewound; Core Material: Ceramic; RoHS: Compliant; Current Rating: 650mA; Max Current Rating: 650mA
footprint FP-AISC-1008-MFG
pins: 1, 2

## CMP-006-00034-1
designator 2?, comment value 5.6nH  (hidden comment: ind 5.6nH 0603)
General Purpose Inductor, 0.0056uH, 5%, 1 Element, Film-Core, Reflow soldering, 0603/0201; Self Resonant Frequency: 4GHz; Current Rating: 350mA; Max Operating Temperature: 125°C; Min Operating Temperature: -55°C; Tolerance: 5%; Max Current Rating: 350mA; Case/Package: 0201
footprint FP-LQP03TG_02-IPC_C
footprint FP-LQP03TG_02-IPC_A
footprint FP-LQP03TG_02-MFG
footprint FP-LQP03TG_02-IPC_B
pins: 1, 2

## CMP-009-00017-5
designator R?, comment value 10k  (hidden comment: Resistor 10k +/-1% 0603 100 mW)
Chip Resistor, 10 KOhm, +/- 1%, 01 W, -55 to 155 degC, 0603 (1608 Metric); Voltage Rating: 50V; Power: 100mW; RoHS Compliant: True; Min Operating Temperature: -55°C; Pins: 2; Case/Package: 0603; Mounting Technology: SM; Max Operating Temperature: 155°C; Tolerance: 1%
footprint RESC1608X55X25ML10T15 (Chip Resistor, 2-Leads, Body 1.70x0.90mm, IPC Low Density)
footprint RESC1608X55X25NL10T15 (Chip Resistor, 2-Leads, Body 1.70x0.90mm, IPC Medium Density)
footprint RESC1608X55X25LL10T15 (Chip Resistor, 2-Leads, Body 1.70x0.90mm, IPC High Density)
pins: 1, 2
1 alternate drawing of the same symbol

## CMP-009-00018-5
designator R?, comment value 10k  (hidden comment: Resistor 10k +/-1% 0805 125 mW)
Chip Resistor, 10 KOhm, +/- 1%, 125 mW, -55 to 155 degC, 0805 (2012 Metric); Power: 125mW; Voltage Rating: 150V; Tolerance: 1%; Pins: 2; Min Operating Temperature: -55°C; Case/Package: 0805; Max Operating Temperature: 155°C; RoHS Compliant: True; Mounting Technology: SM
footprint RESC2013X50X35ML15T15 (Chip Resistor, 2-Leads, Body 2.2x1.4mm, IPC Low Density)
footprint RESC2013X50X35NL15T15 (Chip Resistor, 2-Leads, Body 2.2x1.4mm, IPC Medium Density)
footprint RESC2013X50X35LL15T15 (Chip Resistor, 2-Leads, Body 2.2x1.4mm, IPC High Density)
pins: 1, 2
1 alternate drawing of the same symbol

## CMP-009-00018-5_1
designator R?, comment value 10k  (hidden comment: Resistor 10k +/-1% 0805 125 mW)
Chip Resistor, 10 KOhm, +/- 1%, 125 mW, -55 to 155 degC, 0805 (2012 Metric); Manufacturer: Yageo Group; Manufacturer Part Number: RC0805FR-0710KL; Manufacturer: Vishay; Manufacturer Part Number: CRCW080510K0FKEA; Manufacturer: Panasonic / Panasonic ECG; Manufacturer Part Number: ERJ-6ENF1002V; Power: 125mW; Voltage Rating: 150V; Tolerance: 1%; Pins: 2; Min Operating Temperature: -55°C; Case/Package: 0805; Max Operating Temperature: 155°C; RoHS Compliant: True; Mounting Technology: SM; Component Type: Resistors
footprint RESC2013X50X35ML15T15 (Chip Resistor, 2-Leads, Body 2.2x1.4mm, IPC Low Density)
footprint RESC2013X50X35NL15T15 (Chip Resistor, 2-Leads, Body 2.2x1.4mm, IPC Medium Density)
footprint RESC2013X50X35LL15T15 (Chip Resistor, 2-Leads, Body 2.2x1.4mm, IPC High Density)
pins: 1, 2
1 alternate drawing of the same symbol

## CMP-009-00018-5_2
designator R?, comment value 10k  (hidden comment: Resistor 10k +/-1% 0805 125 mW)
Chip Resistor, 10 KOhm, +/- 1%, 125 mW, -55 to 155 degC, 0805 (2012 Metric); Manufacturer: Yageo Group; Manufacturer Part Number: RC0805FR-0710KL; Manufacturer: Vishay; Manufacturer Part Number: CRCW080510K0FKEA; Manufacturer: Panasonic / Panasonic ECG; Manufacturer Part Number: ERJ-6ENF1002V; Power: 125mW; Voltage Rating: 150V; Tolerance: 1%; Pins: 2; Min Operating Temperature: -55°C; Case/Package: 0805; Max Operating Temperature: 155°C; RoHS Compliant: True; Mounting Technology: SM; Component Type: Resistors
footprint RESC2013X50X35ML15T15 (Chip Resistor, 2-Leads, Body 2.2x1.4mm, IPC Low Density)
footprint RESC2013X50X35NL15T15 (Chip Resistor, 2-Leads, Body 2.2x1.4mm, IPC Medium Density)
footprint RESC2013X50X35LL15T15 (Chip Resistor, 2-Leads, Body 2.2x1.4mm, IPC High Density)
pins: 1, 2
1 alternate drawing of the same symbol

## CMP-009-00031-5
designator R?, comment value 4.7k  (hidden comment: Resistor 4k7 +/-1% 0603 100 mW)
Chip Resistor, 4.7 KOhm, +/- 1%, 0.1 W, -55 to 155 degC, 0603 (1608 Metric); Power: 100mW; Tolerance: 1%; Mounting Technology: SM; Case/Package: 0603; RoHS Compliant: True; Pins: 2; Min Operating Temperature: -55°C; Max Operating Temperature: 155°C
footprint RESC1608X55X25ML10T15 (Chip Resistor, 2-Leads, Body 1.70x0.90mm, IPC Low Density)
footprint RESC1608X55X25NL10T15 (Chip Resistor, 2-Leads, Body 1.70x0.90mm, IPC Medium Density)
footprint RESC1608X55X25LL10T15 (Chip Resistor, 2-Leads, Body 1.70x0.90mm, IPC High Density)
pins: 1, 2
1 alternate drawing of the same symbol

## CMP-009-00032-5
designator R?, comment value 4.7k  (hidden comment: Resistor 4k7 +/-1% 0805 125 mW)
Chip Resistor, 4.7 KOhm, +/- 1%, 0.125 W, -55 to 155 degC, 0805 (2012 Metric); Power: 125mW; Voltage Rating: 150V; Max Operating Temperature: 155°C; Min Operating Temperature: -55°C; Case/Package: 0805; RoHS Compliant: True; Pins: 2; Tolerance: 1%; Mounting Technology: SM
footprint RESC2013X70X40ML20T20 (Chip Resistor, 2-Leads, Body 2.2x1.35mm, IPC Low Density)
footprint RESC2013X70X40NL20T20 (Chip Resistor, 2-Leads, Body 2.2x1.35mm, IPC Medium Density)
footprint RESC2013X70X40LL20T20 (Chip Resistor, 2-Leads, Body 2.2x1.35mm, IPC High Density)
pins: 1, 2
1 alternate drawing of the same symbol

## CMP-009-00067-2
designator R?, comment value 10  (hidden comment: 10R2F)
10R 0.063W 1% 0402 (1005 Metric)  SMD; Power: 63mW; Case/Package: 0402; Tolerance: 1%; Mounting Technology: SMT; Pins: 2
footprint RESC0402(1005)_L (Chip Resistor, Body 1.0x0.5mm, IPC High Density)
pins: 1, 2
1 alternate drawing of the same symbol

## CMP-009-00082-2
designator R?, comment value 22  (hidden comment: 22R2J)
22R 0.063W 5% 0402 (1005 Metric)  SMD; Power: 63mW; Tolerance: 5%; Case/Package: 0402; Pins: 2; Mounting Technology: SMT; Component Type: Resistors
footprint RESC0402(1005)_L (Chip Resistor, Body 1.0x0.5mm, IPC High Density)
pins: 1, 2
1 alternate drawing of the same symbol

## CMP-009-00084-2
designator R?, comment value 240  (hidden comment: 240R2J)
240R 0.063W 5% 0402 (1005 Metric)  SMD; Power: 63mW; Pins: 2; Case/Package: 0402; Mounting Technology: SMT; Tolerance: 5%; Component Type: Resistors
footprint RESC0402(1005)_L (Chip Resistor, Body 1.0x0.5mm, IPC High Density)
pins: 1, 2
1 alternate drawing of the same symbol

## CMP-009-00118-3
designator R?, comment value 1k  (hidden comment: Resistor 1K +/-5% 0805 125 mW)
Chip Resistor, 1 kOhms, +/-5%, 125 mW, -55 to 155 degC, 0805; Tolerance: 5%; Power: 125mW; Case/Package: 0805; Pins: 2; Min Operating Temperature: -55°C; Max Operating Temperature: 155°C
footprint RESC0805(2012)_L (Chip Resistor, Body 2.0x1.3mm, IPC High Density)
pins: 1, 2
1 alternate drawing of the same symbol

## CMP-009-00118-3_1
designator R?, comment value 1k  (hidden comment: Resistor 1K +/-5% 0805 125 mW)
Chip Resistor, 1 kOhms, +/-5%, 125 mW, -55 to 155 degC, 0805; Manufacturer: Yageo Group; Manufacturer Part Number: RC0805JR-071KL; Tolerance: 5%; Power: 125mW; Case/Package: 0805; Pins: 2; Min Operating Temperature: -55°C; Max Operating Temperature: 155°C; Component Type: Resistors
footprint RESC0805(2012)_L (Chip Resistor, Body 2.0x1.3mm, IPC High Density)
pins: 1, 2
1 alternate drawing of the same symbol

## CMP-009-00163-3
designator R?, comment value 200k  (hidden comment: Resistor 200K +/-1 % 0402 63 mW)
Chip Resistor, 200 kOhms, +/-1 %, 63 mW, -55 to 155 degC, 0402; Power: 63mW; Tolerance: 1%; Min Operating Temperature: -55°C; Max Operating Temperature: 155°C; Case/Package: 0402; Pins: 2
footprint RESC0402(1005)_L (Chip Resistor, Body 1.0x0.5mm, IPC High Density)
pins: 1, 2
1 alternate drawing of the same symbol

## CMP-009-00187-1
designator R?, comment value 32.4k  (hidden comment: RES 32.4K 0805)
Fixed Resistor, Metal Glaze/thick Film, 0.25W, 32400ohm, 150V, 0.5% +/-Tol, 100ppm/Cel, Surface Mount, 0805; Power Rating: 250mW; Temperature Coefficient: 100ppm/°C; Working Voltage: 150V; Lifecycle Status: Production; REACH SVHC: Unaffected; Length: 2mm; Width: 1.25mm; Composition: Thick Film; Ratings: AEC-Q200; Mounting Technology: Surface Mount; Height: 500µm; Country of Origin: Japan; China RoHS: Non-Compliant; Case/Package: 0805; Voltage Rating: 150V; Max Operating Temperature: 155°C; RoHS: Compliant; Lead Free: Lead Free; Number of Terminals: 2; Min Operating Temperature: -55°C; Export Control Classification Number (ECCN) Code: EAR99; Tolerance: 0.5%; Introduction Date: 2004-09-15; Harmonized Tariff Schedule (HTS) Code: 8533.21.00.30
footprint FP-RK73H2A-IPC_C
footprint FP-RK73H2A-MFG
footprint FP-RK73H2A-IPC_A
footprint FP-RK73H2A-IPC_B
pins: 1, 2

## CMP-009-00188-1
designator R?, comment value 16.9k  (hidden comment: 16.9k 0805)
Fixed Resistor, Metal Glaze/Thick Film, 0.125W, 16900ohm, 150V, 1% +/-Tol, Surface Mount, 0805; Max Power Dissipation: 125mW; Temperature Coefficient: 100ppm/°C; Export Control Classification Number (ECCN) Code: EAR99; Packaging: Tape & Reel; Length: 2mm; Min Operating Temperature: -55°C; China RoHS: Non-Compliant; Features: Automotive AEC-Q200, Moisture Resistant; Mounting Technology: Surface Mount; Width: 1.25mm; Tolerance: 1%; Number of Terminations: 2; Voltage Rating: 150V; Case/Package: 0805; REACH SVHC: Unaffected; Harmonized Tariff Schedule (HTS) Code: 8533.21.00.30; Composition: Thick Film; Working Voltage: 150V; Number of Terminals: 2; Max Operating Temperature: 155°C; Ratings: AEC-Q200; Country of Origin: Mainland China, Taiwan; Introduction Date: 2012-04-10; Lifecycle Status: Production; Power Rating: 125mW; RoHS: Compliant; Height: 500µm
footprint FP-AC0805-IPC_A
footprint FP-AC0805-IPC_C
footprint FP-AC0805-MFG
footprint FP-AC0805-IPC_B
pins: 1, 2

## CMP-009-00189-1
designator R?, comment value 21k  (hidden comment: res 21k 0805)
125mW Thin Film Resistor 150V ±0.5% ±25ppm/℃ 21kΩ 0805 Chip Resistor - Surface Mount ROHS; Manufacturer Package Identifier: 0805 (2012 metric); Temperature Coefficient: 25ppm/°C; Composition: Thin Film; Mounting Technology: Surface Mount; Max Power Dissipation: 125mW; Lead Free: Lead Free; Min Operating Temperature: -55°C; Number of Terminals: 2; Power Rating: 125mW; Number of Terminations: 2; Max Operating Temperature: 155°C; Case Code (Metric): 0805; Voltage Rating: 150V; Lifecycle Status: Production; Case/Package: 0805; Voltage Rating (DC): 150V; Working Voltage: 150V; Height: 500µm; Packaging: Tape & Reel (TR); RoHS: Compliant; China RoHS: Non-Compliant; Tolerance: 0.5%; Width: 1.25mm; Length: 2mm; REACH SVHC: Unaffected
footprint FP-RT0805-MFG
footprint FP-RT0805-IPC_C
footprint FP-RT0805-IPC_B
footprint FP-RT0805-IPC_A
pins: 1, 2

## CMP-009-00190-1
designator R?, comment value 68  (hidden comment: 68 0805)
Res Thick Film 0805 68 Ohm 5% 0.125W(1/8W) ±200ppm/C Pad SMD T/R Automotive AEC-Q200; Manufacturer Package Identifier: 0805 (2012 metric); Working Voltage: 150V; Power Rating: 125mW; Temperature Coefficient: 100ppm/°C; Mounting Technology: Surface Mount; RoHS: Compliant; Height: 500µm; Packaging: Tape & Reel (TR); Case Code (Metric): 2012; Radiation Hardening: No; Voltage Rating: 150V; China RoHS: Non-Compliant; Composition: Thick Film; Schedule B: 8533210045, 8533210045; Max Power Dissipation: 125mW; Lifecycle Status: Production; Features: Automotive AEC-Q200; Case Code (Imperial): 0805; Width: 1.25mm; REACH SVHC: Unaffected; Lead Free: Lead Free; Number of Terminations: 2; Min Operating Temperature: -55°C; Depth: 1.25mm; Number of Terminals: 2; Military Standard: Not; Contact Plating: Tin; Case/Package: 0805; Tolerance: 5%; Ratings: AEC-Q200; Max Operating Temperature: 155°C; Length: 2mm
footprint FP-RMCF0805-MFG
footprint FP-RMCF0805-IPC_C
footprint FP-RMCF0805-IPC_B
footprint FP-RMCF0805-IPC_A
pins: 1, 2

## CMP-009-00191-1
designator R?, comment value 2  (hidden comment: res 2ohms 0603)
Res Thick Film 0603 2 Ohm 5% 0.1W(1/10W) ±200ppm/C Pad SMD Automotive T/R; Working Voltage: 75V; Power Rating: 100mW; Temperature Coefficient: 200ppm/°C; Height: 450µm; RoHS: Compliant; Number of Terminals: 2; Length: 1.55mm; Max Power Dissipation: 100mW; Ratings: AEC-Q200; Min Operating Temperature: -55°C; Width: 800µm; REACH SVHC: Unaffected; Tolerance: 5%; Composition: Thick Film; Number of Terminations: 2; Features: Automotive AEC-Q200; Max Operating Temperature: 155°C; China RoHS: Non-Compliant; Lifecycle Status: Production; Packaging: Digi-Reel®; Case Code (Metric): 1608; Case Code (Imperial): 0603; Voltage Rating: 75V; Mounting Technology: Surface Mount; Lead Free: Lead Free; Contact Plating: Tin; Schedule B: 8533210045, 8533210045; Case/Package: 0603; Radiation Hardening: No
footprint FP-RMCF0603-MFG
footprint FP-RMCF0603-IPC_A
footprint FP-RMCF0603-IPC_C
footprint FP-RMCF0603-IPC_B
pins: 1, 2

## CMP-009-00194-1
designator R?, comment value 30.1k  (hidden comment: res 30.1k 0603)
Res Thick Film 0603 30.1K Ohm 1% 0.1W(1/10W) ±100ppm/C Pad SMD Automotive T/R; Part Series: Precision Thick Film Chip Resistors; Manufacturer Lifecycle Status: ACTIVE; Power Rating: 100mW; Working Voltage: 75V; Temperature Coefficient: 100ppm/°C; Min Operating Temperature: -55°C; Max Power Dissipation: 100mW; Max Operating Temperature: 155°C; REACH SVHC: Unaffected; Lifecycle Status: Production; Contact Plating: Tin; Radiation Hardening: No; Mounting Technology: Surface Mount; Composition: Thick Film; Width: 800µm; Features: Automotive AEC-Q200; Termination: SMD/SMT; Depth: 800µm; Case/Package: 0603; RoHS: Compliant; Case Code (Imperial): 0603; Height: 450µm; Ratings: AEC-Q200; China RoHS: Non-Compliant; Tolerance: 1%; Number of Terminations: 2; Length: 1.6mm; Military Standard: Not; Number of Terminals: 2; Schedule B: 8533210045, 8533210045; Voltage Rating: 75V
footprint FP-ERJ3EK-IPC_A
footprint FP-ERJ3EK-IPC_C
footprint FP-ERJ3EK-IPC_B
footprint FP-ERJ3EK-MFG
pins: 1, 2